# EAGLE library part PI_HEADER (library evfcam)
Raspberry Pi 40-pin header
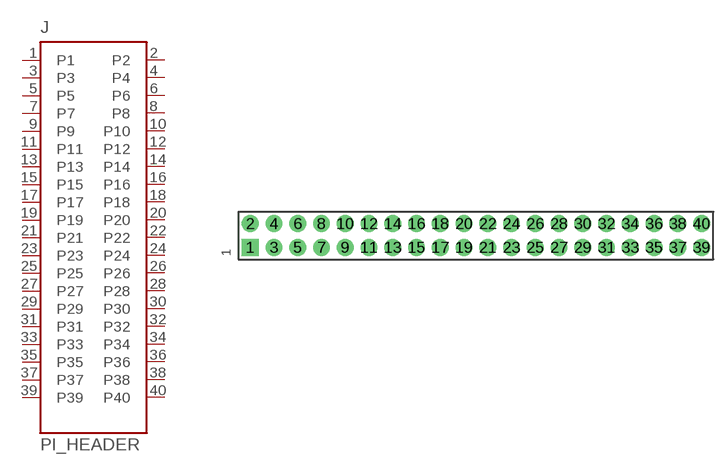
[diagram p0: symbol with the pads of PI_HEADER_2X20; footprint PI_HEADER_2X20]

Designator prefix J

## PI_HEADER  [PI_HEADER_2X20]
1  P1  pas
2  P2  pas
3  P3  pas
4  P4  pas
5  P5  pas
6  P6  pas
7  P7  pas
8  P8  pas
9  P9  pas
10  P10  pas
11  P11  pas
12  P12  pas
13  P13  pas
14  P14  pas
15  P15  pas
16  P16  pas
17  P17  pas
18  P18  pas
19  P19  pas
20  P20  pas
21  P21  pas
22  P22  pas
23  P23  pas
24  P24  pas
25  P25  pas
26  P26  pas
27  P27  pas
28  P28  pas
29  P29  pas
30  P30  pas
31  P31  pas
32  P32  pas
33  P33  pas
34  P34  pas
35  P35  pas
36  P36  pas
37  P37  pas
38  P38  pas
39  P39  pas
40  P40  pas

## Footprint PI_HEADER_2X20 (pad centres in mm)
2x20 2.54 mm female header for Raspberry Pi. Odd pins on the lower row, pin 1 square.
drill 1 pad 1.8 square: 1 -24.13,-1.27
drill 1 pad 1.8 round: 2 -24.13,1.27; 3 -21.59,-1.27; 4 -21.59,1.27; 5 -19.05,-1.27; 6 -19.05,1.27; 7 -16.51,-1.27; 8 -16.51,1.27; 9 -13.97,-1.27; 10 -13.97,1.27; 11 -11.43,-1.27; 12 -11.43,1.27; 13 -8.89,-1.27; 14 -8.89,1.27; 15 -6.35,-1.27; 16 -6.35,1.27; 17 -3.81,-1.27; 18 -3.81,1.27; 19 -1.27,-1.27; 20 -1.27,1.27; 21 1.27,-1.27; 22 1.27,1.27; 23 3.81,-1.27; 24 3.81,1.27; 25 6.35,-1.27; 26 6.35,1.27; 27 8.89,-1.27; 28 8.89,1.27; 29 11.43,-1.27; 30 11.43,1.27; 31 13.97,-1.27; 32 13.97,1.27; 33 16.51,-1.27; 34 16.51,1.27; 35 19.05,-1.27; 36 19.05,1.27; 37 21.59,-1.27; 38 21.59,1.27; 39 24.13,-1.27; 40 24.13,1.27